# Altium schematic symbol library General_Lib.SchLib: 18 symbols
Pins are listed as number, name and electrical type; pins without a type are passive.

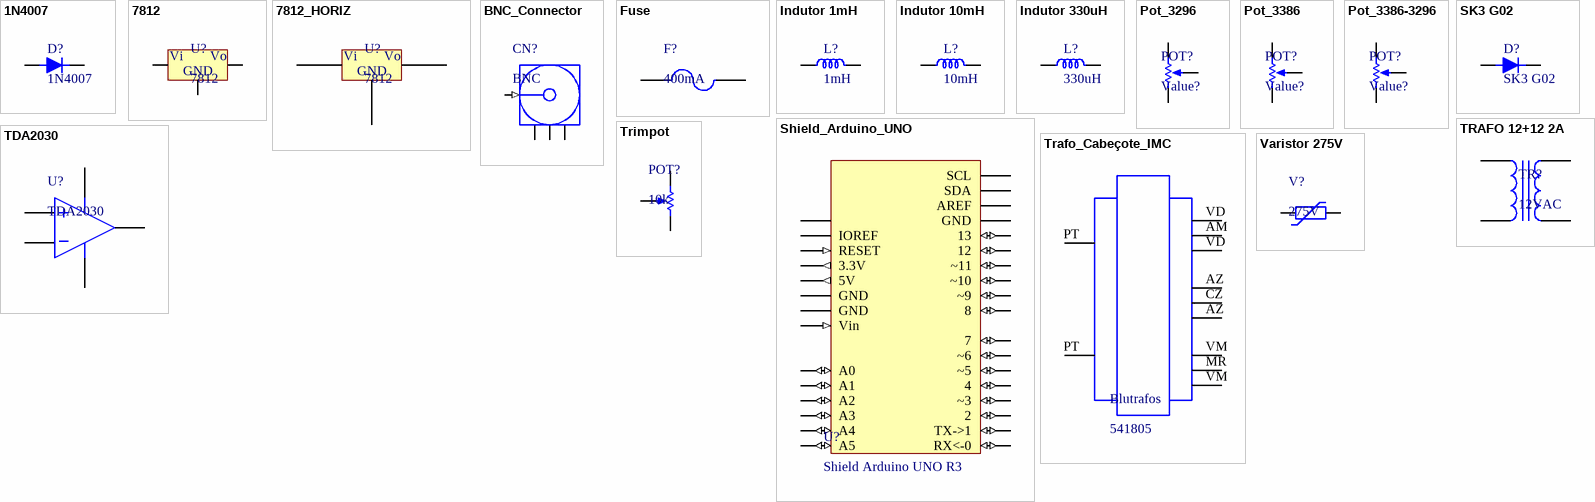
[diagram p0: symbols 1N4007 to Varistor 275V]

## 1N4007
designator D?
DO-41 SHOTKY DIODE 1A 700V
footprint DO-41F
pins: A, K

## 7812
designator U?
LINEAR VOLTAGE REGULATOR 12V
footprint TO-220
pins: 1 Vin, 2 GND, 3 Vout
text: Vi; Vo

## 7812_HORIZ
designator U?, comment 7812
LINEAR VOLTAGE REGULATOR 12V
footprint 7812_HORIZ_SINK
pins: 1 Vin, 2 GND, 3 Vout
text: Vi; Vo

## BNC_Connector
designator CN?, comment BNC
RIGHT ANGLE RF COAXIAL BNC CONNECTOR
footprint BNC RIGHT ANGLE
pins: 1 Signal (in) "Signal Pin", 2 GND (power), 3 GND (power), 4 GND (power)

## Fuse
designator F?, comment 400mA
20x5mm FUSE 250V 400mA
footprint FUSE 20MM
pins: 1, 2

## Indutor 1mH
designator L?, comment 1mH
1mH INDUCTOR
footprint GENERAL_HOLE_INDUCTOR
pins: 1, 2

## Indutor 10mH
designator L?, comment 10mH
10mH INDUCTOR
footprint GENERAL_HOLE_INDUCTOR
pins: 1, 2

## Indutor 330uH
designator L?, comment 330uH
330uH INDUCTOR
footprint GENERAL_HOLE_INDUCTOR
pins: 1, 2

## Pot_3296
designator POT?, comment Value?
Trimpot Horizontal 3386
footprint 3296
pins: 1 TOP, 2 BOT, 3 TAP

## Pot_3386
designator POT?, comment Value?
Trimpot Horizontal 3386
footprint 3386
pins: 1 TOP, 2 BOT, 3 TAP

## Pot_3386-3296
designator POT?, comment Value?
Trimpot Horizontal Footprint 3386+3296
footprint 3386-3296
pins: 1 TOP, 2 BOT, 3 TAP

## Shield_Arduino_UNO
designator U?, comment Shield Arduino UNO R3
Shield for Arduino UNO R3 Board
footprint Shield_UNO
pins: 0 RX<-0 (io), 1 TX->1 (io), 2 (io), 3 ~3 (io), 4 (io), 5 ~5 (io), 6 ~6 (io), 7 (io), 8 (io), 9 ~9 (io), 10 ~10 (io), 11 ~11 (io), 12 (io), 13 (io), 14 GND, 15 AREF, 16 SDA, 17 SCL, 18 A5 (io), 19 A4 (io), 20 A3 (io), 21 A2 (io), 22 A1 (io), 23 A0 (io), 24 Vin (in), 25 GND, 26 GND, 27 5V (out), 28 3.3V (out), 29 RESET (in), 30 IOREF, 31

## SK3 G02
designator D?
DIODO SEMIKRON
footprint DO-201
pins: A, K

## TDA2030
designator U?
14 W HI-FI AUDIO AMPLIFIER WITH SINK
footprint TDA2003+SINK
pins: 1 IN+, 2 IN-, 3 V- (power), 4 OUT, 5 V+ (power)

## TRAFO 12+12 2A
designator TR?, comment 12VAC
TRANSFORMADOR 220-12+12 2A
footprint TRAFO 12+12 2A
pins: 1, 2, 3, 4

## Trafo_Cabeçote_IMC
designator Blutrafos, comment 541805
Trafo da BLUTRAFOS para uso nos cabeçotes (vin =45V)
pins: AM, AZ, AZ, CZ, MR, PT, PT, VD, VD, VM, VM

## Trimpot
designator POT?, comment 10k
TRIMPOT 10K 3006P
footprint TRIMPOT 3006P
pins: 1 TOP, 2 BOT, 3 TAP

## Varistor 275V
designator V?, comment 275V
VARISTOR 275V 2KA 20MM DISC
footprint VARISTOR_DISC_20MM
pins: 1, 2